# Altium footprint library CHIP-Library.PcbLib: 345 footprints (part 1 of 22)
Each footprint in its own frame and in the unit in brackets; x right, y up, seen from the top. Pads: shape width x height; smd on the part's side, far side on the other; paste and mask are expansions set on the pad; w line width, h text height; cw(c..) or ccw(c..) is an arc to the next point about the centre after c.
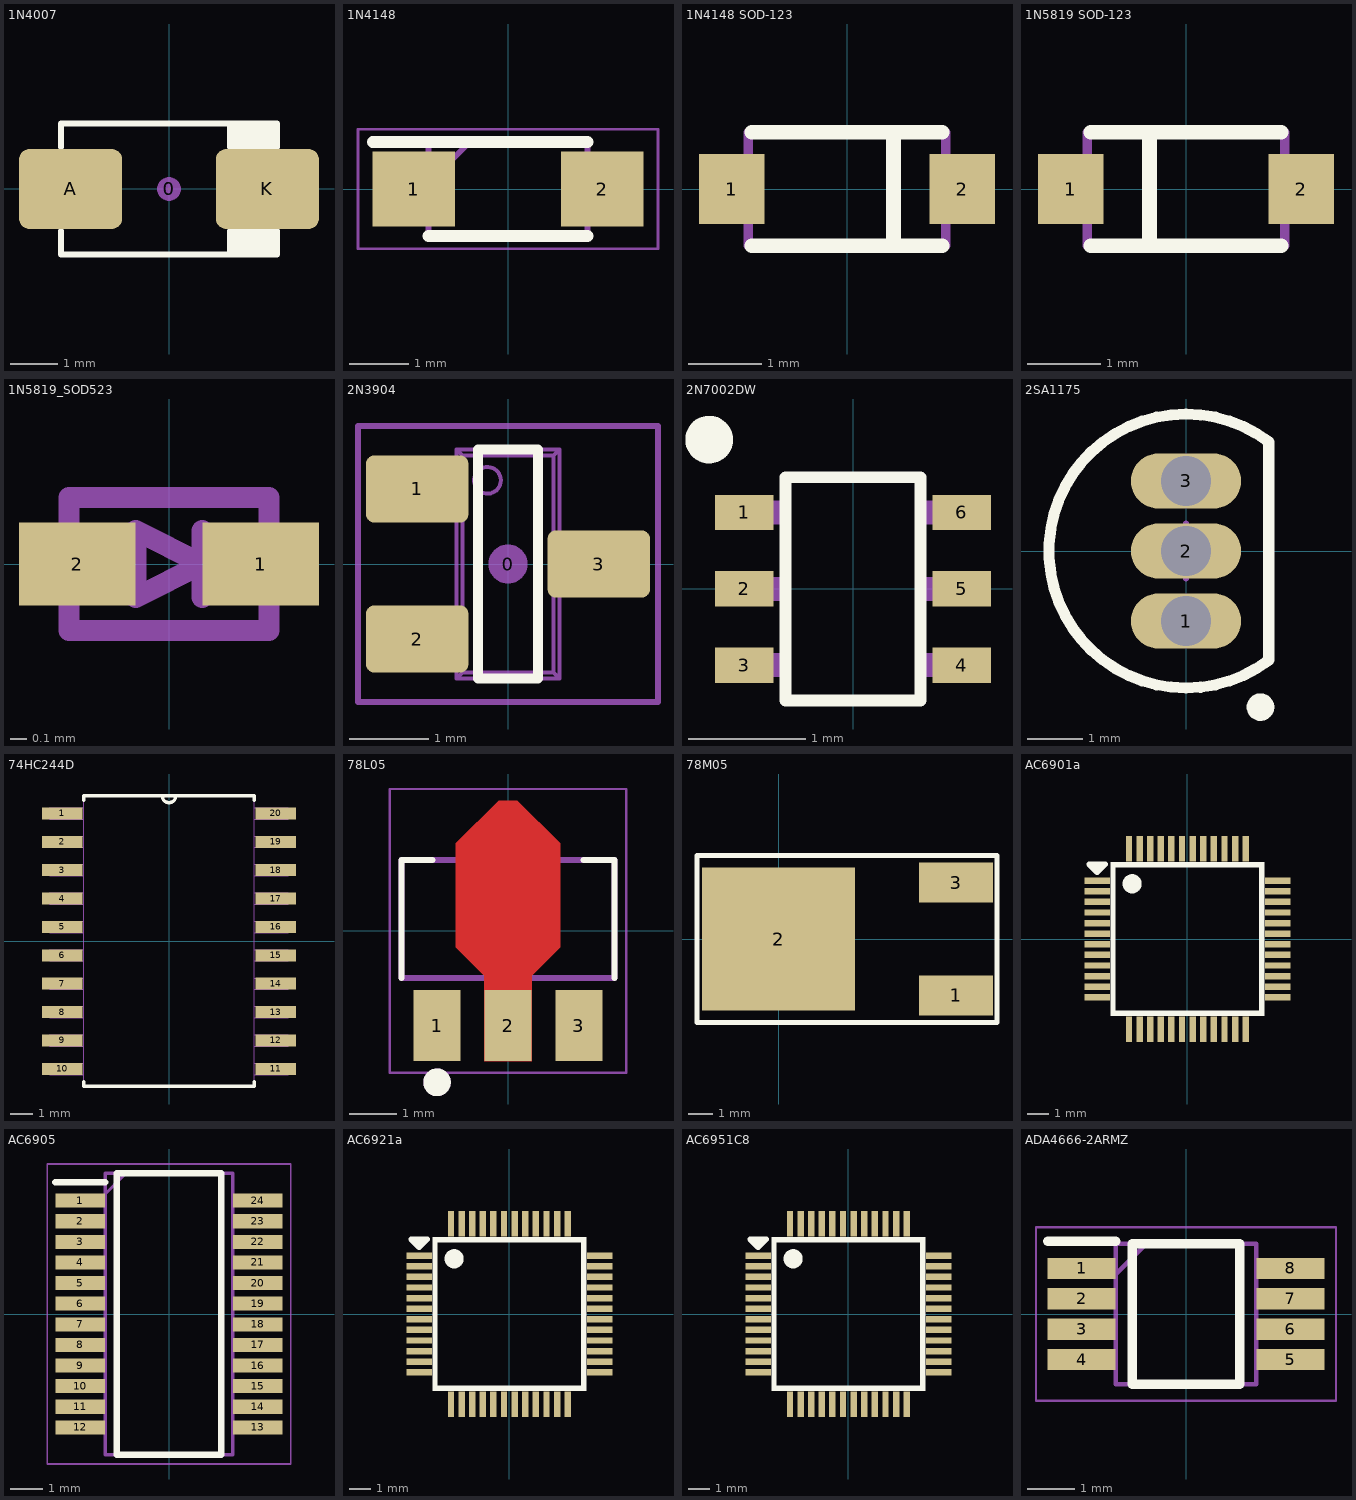
[diagram p0: the footprints below, top view; thin cyan lines are the x and y axes]

## 1N4007 [mm] "DO214 variation AC. SMA"
height 2.5
pads (3):
  round 0.508 on Mech15: 0(0,0)
  rrect25% 2.2x1.7 smd: A(-2.1,0) K(2.1,0)
Top Overlay:
  rectangle: 1.3,0.9 2.3,1.4
  rectangle: 1.3,-1.4 2.3,-0.9
  lines w0.127: -2.3,-0.9 -2.3,-1.4 2.3,-1.4 2.3,-0.9 1.3,-0.9 1.3,-1.4 ; -2.3,0.9 -2.3,1.4 2.3,1.4 2.3,0.9 1.3,0.9 ; 1.3,0.911 1.3,1.4
3D body "SW3dPS-DO-214AC SMA.STEP": height 2.42, standoff 0.02, extent -2.6,-1.3 2.6,1.3

## 1N4148 [mm]
pads (2):
  rect 1.4x1.27 smd: 1(-1.6,0) 2(1.6,0)
Top Overlay:
  lines w0.2: -2.3,0.8 1.35,0.8 ; -1.35,-0.8 1.35,-0.8
Mechanical 13:
  lines w0.1: -1.35,0.1 -0.65,0.8 ; -1.35,-0.8 -1.35,0.8 1.35,0.8 1.35,-0.8 -1.35,-0.8
Mechanical 15:
  lines w0.05: -2.55,-1.016 -2.55,1.016 2.55,1.016 2.55,-1.016 -2.55,-1.016
3D body "1n4148ws-7-f.stp": height 1.06, standoff -0.04, extent -1.25,-0.635 1.25,0.665

## 1N4148 SOD-123 [mm]
pads (2):
  rect 0.9x0.95 smd: 1(-1.575,0) 2(1.575,0)
Top Overlay:
  lines w0.203: -1.3,-0.775 0.635,-0.775 0.635,0.775 -1.3,0.775 ; -0.5,-0.775 1.3,-0.775 ; -0.5,0.775 1.3,0.775
Mechanical 13:
  lines w0.127: -1.35,-0.775 -1.35,0.775 1.35,0.775 1.35,-0.775 -1.35,-0.775
3D body "CircuitWorks-SOD123.step": height 1.28, standoff 0.01, extent -1.85,-0.8 1.85,0.8

## 1N5819 SOD-123 [mm]
pads (2):
  rect 0.9x0.95 smd: 1(-1.575,0) 2(1.575,0)
Top Overlay:
  lines w0.203: -1.3,-0.775 -0.5,-0.775 ; -1.3,0.775 -0.5,0.775 ; 1.3,-0.775 -0.5,-0.775 ; 1.3,0.775 -0.5,0.775 ; -0.5,-0.775 -0.5,0.775
Mechanical 13:
  lines w0.127: -1.35,-0.775 -1.35,0.775 1.35,0.775 1.35,-0.775 -1.35,-0.775
3D body "CircuitWorks-SOD123.step": height 1.28, standoff 0.01, extent -1.85,-0.8 1.85,0.8

## 1N5819_SOD523 [mm]
pads (2):
  rect 0.7x0.5 smd: 1(0.55,0) 2(-0.55,0)
Mechanical 13:
  region: -0.6,-0.15 -0.801,-0.15 -0.801,0.15 -0.6,0.15
  region: 0.8,-0.15 0.6,-0.15 0.6,0.15 0.8,0.15
  lines w0.127: 0.2,-0.2 0.2,0 ; 0.2,0.2 0.2,0 ; 0.2,0 -0.2,-0.2 -0.2,0.2 0.2,0 ; -0.6,-0.4 -0.6,0.4 0.6,0.4 0.6,-0.4 -0.6,-0.4
3D body "User Library-SOD-523F.step": height 0.71, standoff 0.01, extent -0.8,-0.399 0.8,0.399

## 2N3904 [mm] "BJT TRANSISTOR SOT23, 3 pin"
height 1.003
pads (4):
  round 0.5 on Mech15: 0(0,0)
  rrect25% 1.3x0.85 smd: 1(-1.15,0.95) 2(-1.15,-0.95) 3(1.15,0)
Top Overlay:
  lines w0.127: -0.381,-1.45 0.381,-1.45 0.381,1.45 -0.381,1.45 -0.381,-1.45
  text "." at -2.125,0.95 h1.4
Mechanical 13:
  circle w0.05: c-0.26,1.06 r0.169
  lines w0.05: -1.19,-1.19 -1.19,-0.71 ; -1.19,0.71 -1.19,1.19 ; -1.099,-1.19 -1.099,-0.71 ; -1.099,0.71 -1.099,1.19 ; -1.074,-1.19 -1.074,-0.71 ; -1.074,0.71 -1.074,1.19 ; -0.825,-1.19 -0.825,-0.71 ; -0.825,0.71 -0.825,1.19 ; -0.65,-1.19 -1.4,-1.19 -1.4,-0.71 -0.65,-0.71 ; -0.65,0.71 -1.4,0.71 -1.4,1.19 -0.65,1.19 ; 0.65,-0.24 1.4,-0.24 1.4,0.24 0.65,0.24 ; 0.825,-0.24 0.825,0.24 ; 1.074,-0.24 1.074,0.24 ; 1.099,-0.24 1.099,0.24 ; 1.19,-0.24 1.19,0.24 ; -0.65,-1.45 -0.576,-1.376 ; -0.65,-1.45 -0.65,1.45 ; -0.65,-1.45 0.65,-1.45 ; -0.65,1.45 0.65,1.45 ; -0.65,1.45 -0.576,1.376 ; -0.576,-1.376 -0.576,1.376 ; -0.576,-1.376 0.576,-1.376 ; -0.576,1.376 0.576,1.376 ; 0.576,-1.376 0.576,1.376 ; 0.576,-1.376 0.65,-1.45 ; 0.576,1.376 0.65,1.45 ; 0.65,-1.45 0.65,1.45
Mechanical 15:
  lines w0.076: -1.9,-1.75 1.9,-1.75 1.9,1.75 -1.9,1.75 -1.9,-1.75
3D body "SOT23-3.STEP": height 1.29, standoff -0.01, extent -1.4,-1.45 1.4,1.45

## 2N7002DW [mm] "SOT363"
pads (6):
  rect 0.5x0.3 smd paste-0.025 mask+0: 1(-0.925,0.65) 2(-0.925,0) 3(-0.925,-0.65) 4(0.925,-0.65) 5(0.925,0) 6(0.925,0.65)
Top Overlay:
  circle w0.2: c-1.225,1.27 r0.103
  lines w0.102: -0.575,-0.95 -0.575,0.95 0.575,0.95 0.575,-0.95 -0.575,-0.95
Top Solder:
  region: 1.225,0.45 0.6,0.45 0.6,0.85 1.225,0.85
  region: 1.225,-0.2 0.6,-0.2 0.6,0.2 1.225,0.2
  region: 1.225,-0.85 0.6,-0.85 0.6,-0.45 1.225,-0.45
  region: -0.6,-0.85 -1.225,-0.85 -1.225,-0.45 -0.6,-0.45
  region: -0.6,-0.2 -1.225,-0.2 -1.225,0.2 -0.6,0.2
  region: -0.6,0.45 -1.225,0.45 -1.225,0.85 -0.6,0.85
Mechanical 13:
  region: 1.05,0.55 0.575,0.55 0.575,0.75 1.05,0.75
  region: 1.05,-0.1 0.575,-0.1 0.575,0.1 1.05,0.1
  region: 1.05,-0.75 0.575,-0.75 0.575,-0.55 1.05,-0.55
  region: -0.575,-0.75 -1.05,-0.75 -1.05,-0.55 -0.575,-0.55
  region: -0.575,-0.1 -1.05,-0.1 -1.05,0.1 -0.575,0.1
  region: -0.575,0.55 -1.05,0.55 -1.05,0.75 -0.575,0.75
3D body "step_temp.STEP": height 1, standoff 0, extent -1.05,-1 1.05,1

## 2SA1175 [mm] "TO, Flat Index; 3 In-Line, Axial Leads; Body Dia. 4.5mm; Leads 0.51 x 0.48 mm (max)"
height 6.86
pads (3):
  oval 2x1 hole 0.9: 1(0,-1.27) 2(0,0) 3(0,1.27)
Top Overlay:
  circle w0.25: c1.35,-2.83 r0.125
  lines w0.2: 1.5,-1.98 cw(c0,0) 1.5,1.98 1.5,-1.98
Mechanical 13:
  lines w0.1: 1.5,-1.98 cw(c0,0) 1.5,1.98 1.5,-1.98
Mechanical 15:
  lines w0.1: -0.5,0 0.5,0 ; 0,-0.5 0,0.5
3D body: height 6.86, standoff 2.2, extent -2.485,-2.495 1.501,2.495

## 74HC244D [mil] "Octal buffer/line driver - SO20 Package"
height 35.43
pads (20):
  rect 71x21 smd: 1(-188,225) 2(-188,175) 3(-188,125) 4(-188,75) 5(-188,25) 6(-188,-25) 7(-188,-75) 8(-188,-125) 9(-188,-175) 10(-188,-225) 11(188,-225) 12(188,-175) 13(188,-125) 14(188,-75) 15(188,-25) 16(188,25) 17(188,75) 18(188,125) 19(188,175) 20(188,225)
Top Overlay:
  lines w6: -150,-248 -150,-256 150,-256 150,-248 ; -150,248 -150,256 -12,256 ; 150,248 150,256 12,256 ; -12,256 ccw(c0,256) 12,256 ; -12,256 12,256
Mechanical 13:
  lines w0: -12,256 ccw(c0,256) 12,256 ; -12,256 -150,256 -150,-256 150,-256 150,256 12,256 ; -12,256 12,256 ; -210,-235 -150,-235 -150,-215 -210,-215 -210,-235 ; -210,-185 -150,-185 -150,-165 -210,-165 -210,-185 ; -210,-135 -150,-135 -150,-115 -210,-115 -210,-135 ; -210,-85 -150,-85 -150,-65 -210,-65 -210,-85 ; -210,-35 -150,-35 -150,-15 -210,-15 -210,-35 ; -210,15 -150,15 -150,35 -210,35 -210,15 ; -210,65 -150,65 -150,85 -210,85 -210,65 ; -210,115 -150,115 -150,135 -210,135 -210,115 ; -210,165 -150,165 -150,185 -210,185 -210,165 ; -210,215 -150,215 -150,235 -210,235 -210,215 ; 150,-235 210,-235 210,-215 150,-215 150,-235 ; 150,-185 210,-185 210,-165 150,-165 150,-185 ; 150,-135 210,-135 210,-115 150,-115 150,-135 ; 150,-85 210,-85 210,-65 150,-65 150,-85 ; 150,-35 210,-35 210,-15 150,-15 150,-35 ; 150,15 210,15 210,35 150,35 150,15 ; 150,65 210,65 210,85 150,85 150,65 ; 150,115 210,115 210,135 150,135 150,115 ; 150,165 210,165 210,185 150,185 150,165 ; 150,215 210,215 210,235 150,235 150,215
3D body "User Library-SOIC20.step": height 86.61, standoff -1.47, extent -199.48,-248.04 199.49,248.03

## 78L05 [mm] "SOT-89"
pads (3):
  rect 1x1.5 smd: 1(-1.5,-2) 3(1.5,-2)
  rect 1x1.5 smd paste-2 mask+0: 2(0,-2)
Top Layer:
  region: 1.1,1.85 1.1,-0.35 0.5,-0.95 0.5,-2.75 -0.5,-2.75 -0.5,-0.95 -1.1,-0.35 -1.1,1.85 -0.2,2.75 0.2,2.75
Top Overlay:
  circle w0.3: c-1.5,-3.2 r0.141
  lines w0.127: -2.25,-1 -2.25,1.5 -1.6,1.5 ; 1.6,1.5 2.25,1.5 2.25,-1
Top Paste:
  region: 1.1,1.85 1.1,-0.35 0.5,-0.95 0.5,-2.75 -0.5,-2.75 -0.5,-0.95 -1.1,-0.35 -1.1,1.85 -0.2,2.75 0.2,2.75
Top Solder:
  region: 1.2,1.85 1.2,-0.35 0.6,-0.95 0.6,-2.85 -0.6,-2.85 -0.6,-0.95 -1.2,-0.35 -1.2,1.85 -0.2,2.85 0.2,2.85
Mechanical 13:
  circle w0.3: c-1.5,-3.2 r0.141
  lines w0.127: -2.25,-1 -2.25,1.5 2.25,1.5 2.25,-1 -2.25,-1
Mechanical 15:
  lines w0.05: -2.5,-3 -2.5,3 2.5,3 2.5,-3 -2.5,-3
3D body "User Library-SOT89-3-1.step": height 1.7, standoff 0, extent -2.286,-2.352 2.413,2.098

## 78M05 [mm] "D-PAK"
height 2.38
pads (3):
  rect 3x1.6 smd: 1(7.18,-2.286) 3(7.18,2.286)
  rect 6.2x5.8 smd paste-3: 2(0,0)
Top Overlay:
  lines w0.2: 7.137,3.378 8.839,3.378 8.839,-3.378 -3.302,-3.378 -3.302,3.378 7.163,3.378
Top Paste:
  rectangle: -2.667,1.397 -1.397,2.413
  rectangle: -2.667,-0.508 -1.397,0.508
  rectangle: -2.667,-2.286 -1.397,-1.27
  rectangle: -0.635,-0.508 0.635,0.508
  rectangle: -0.635,1.397 0.635,2.413
  rectangle: -0.635,-2.286 0.635,-1.27
  rectangle: 1.515,-0.508 2.785,0.508
  rectangle: 1.515,1.397 2.785,2.413
  rectangle: 1.515,-2.286 2.785,-1.27
3D body "User Library-TO252AA.STEP": height 2.3, standoff -0.01, extent -2.7,-3.29 7,3.29

## AC6901a [mm]
height 5.33
pads (48):
  rect 1.2x0.3 smd mask+0.051: 1(-4.25,2.75) 2(-4.25,2.25) 3(-4.25,1.75) 4(-4.25,1.25) 5(-4.25,0.75) 6(-4.25,0.25) 7(-4.25,-0.25) 8(-4.25,-0.75) 9(-4.25,-1.25) 10(-4.25,-1.75) 11(-4.25,-2.25) 12(-4.25,-2.75) 25(4.25,-2.75) 26(4.25,-2.25) 27(4.25,-1.75) 28(4.25,-1.25) 29(4.25,-0.75) 30(4.25,-0.25) 31(4.25,0.25) 32(4.25,0.75) 33(4.25,1.25) 34(4.25,1.75) 35(4.25,2.25) 36(4.25,2.75)
  rect 0.3x1.2 smd mask+0.051: 13(-2.75,-4.25) 14(-2.25,-4.25) 15(-1.75,-4.25) 16(-1.25,-4.25) 17(-0.75,-4.25) 18(-0.25,-4.25) 19(0.25,-4.25) 20(0.75,-4.25) 21(1.25,-4.25) 22(1.75,-4.25) 23(2.25,-4.25) 24(2.75,-4.25) 37(2.75,4.25) 38(2.25,4.25) 39(1.75,4.25) 40(1.25,4.25) 41(0.75,4.25) 42(0.25,4.25) 43(-0.25,4.25) 44(-0.75,4.25) 45(-1.25,4.25) 46(-1.75,4.25) 47(-2.25,4.25) 48(-2.75,4.25)
Top Overlay:
  circle w0.6: c-2.6,2.6 r0.15
  rectangle: -3.373,-3.627 3.627,-3.373
  region: 3.373,3.373 3.373,-3.627 3.627,-3.627 3.627,3.373
  region: -2.992,-3.373 -3.627,-3.373 -3.627,-3.627 -2.992,-3.627
  region: -3.627,-2.992 -3.627,-3.627 -3.373,-3.627 -3.373,-2.992
  region: -2.992,3.627 -3.627,3.627 -3.627,3.373 -2.992,3.373
  region: -3.373,-3.627 -3.373,3.627 -3.627,3.627 -3.627,-3.627
  region: 3.627,2.992 3.627,3.627 3.373,3.627 3.373,2.992
  rectangle: -3.175,3.373 3.627,3.627
  region: -4.25,3.131 -3.869,3.512 -4.631,3.512
  lines w0.254: -3.5,-3.119 -3.5,-3.5 -3.119,-3.5 ; -3.5,3.119 -3.5,3.5 -3.119,3.5 ; 3.119,-3.5 3.5,-3.5 3.5,-3.119 ; 3.119,3.5 3.5,3.5 3.5,3.119 ; -4.631,3.512 -4.25,3.131 -3.869,3.512 -4.25,3.512 -4.631,3.512
3D body "LQFP48.STEP": height 1.5, standoff 0, extent -4.5,-4.5 4.5,4.5

## AC6905 [mm]
pads (24):
  rect 1.535x0.435 smd: 1(-2.732,3.492) 2(-2.732,2.858) 3(-2.732,2.222) 4(-2.732,1.588) 5(-2.732,0.952) 6(-2.732,0.318) 7(-2.732,-0.318) 8(-2.732,-0.952) 9(-2.732,-1.588) 10(-2.732,-2.222) 11(-2.732,-2.858) 12(-2.732,-3.492) 13(2.732,-3.492) 14(2.732,-2.858) 15(2.732,-2.222) 16(2.732,-1.588) 17(2.732,-0.952) 18(2.732,-0.318) 19(2.732,0.318) 20(2.732,0.952) 21(2.732,1.588) 22(2.732,2.222) 23(2.732,2.858) 24(2.732,3.492)
Top Overlay:
  lines w0.2: -3.5,4.06 -1.965,4.06 ; -1.615,-4.331 -1.615,4.331 1.615,4.331 1.615,-4.331 -1.615,-4.331
Mechanical 13:
  lines w0.1: -1.965,3.696 -1.33,4.331 ; -1.965,-4.331 -1.965,4.331 1.965,4.331 1.965,-4.331 -1.965,-4.331
Mechanical 15:
  lines w0.05: -3.75,-4.619 -3.75,4.619 3.75,4.619 3.75,-4.619 -3.75,-4.619
3D body "AC6905A.stp": height 1.8, standoff 0, extent -3.01,-4.331 3.01,4.331

## AC6921a [mm]
height 5.33
pads (48):
  rect 1.2x0.3 smd mask+0.051: 1(-4.25,2.75) 2(-4.25,2.25) 3(-4.25,1.75) 4(-4.25,1.25) 5(-4.25,0.75) 6(-4.25,0.25) 7(-4.25,-0.25) 8(-4.25,-0.75) 9(-4.25,-1.25) 10(-4.25,-1.75) 11(-4.25,-2.25) 12(-4.25,-2.75) 25(4.25,-2.75) 26(4.25,-2.25) 27(4.25,-1.75) 28(4.25,-1.25) 29(4.25,-0.75) 30(4.25,-0.25) 31(4.25,0.25) 32(4.25,0.75) 33(4.25,1.25) 34(4.25,1.75) 35(4.25,2.25) 36(4.25,2.75)
  rect 0.3x1.2 smd mask+0.051: 13(-2.75,-4.25) 14(-2.25,-4.25) 15(-1.75,-4.25) 16(-1.25,-4.25) 17(-0.75,-4.25) 18(-0.25,-4.25) 19(0.25,-4.25) 20(0.75,-4.25) 21(1.25,-4.25) 22(1.75,-4.25) 23(2.25,-4.25) 24(2.75,-4.25) 37(2.75,4.25) 38(2.25,4.25) 39(1.75,4.25) 40(1.25,4.25) 41(0.75,4.25) 42(0.25,4.25) 43(-0.25,4.25) 44(-0.75,4.25) 45(-1.25,4.25) 46(-1.75,4.25) 47(-2.25,4.25) 48(-2.75,4.25)
Top Overlay:
  circle w0.6: c-2.6,2.6 r0.15
  rectangle: -3.175,3.373 3.627,3.627
  region: 3.627,2.992 3.627,3.627 3.373,3.627 3.373,2.992
  region: -3.373,-3.627 -3.373,3.627 -3.627,3.627 -3.627,-3.627
  region: -2.992,3.627 -3.627,3.627 -3.627,3.373 -2.992,3.373
  region: -3.627,-2.992 -3.627,-3.627 -3.373,-3.627 -3.373,-2.992
  region: -2.992,-3.373 -3.627,-3.373 -3.627,-3.627 -2.992,-3.627
  region: 3.373,3.373 3.373,-3.627 3.627,-3.627 3.627,3.373
  rectangle: -3.373,-3.627 3.627,-3.373
  region: -4.25,3.131 -3.869,3.512 -4.631,3.512
  lines w0.254: -3.5,-3.119 -3.5,-3.5 -3.119,-3.5 ; -3.5,3.119 -3.5,3.5 -3.119,3.5 ; 3.119,-3.5 3.5,-3.5 3.5,-3.119 ; 3.119,3.5 3.5,3.5 3.5,3.119 ; -4.631,3.512 -4.25,3.512 -3.869,3.512 -4.25,3.131 -4.631,3.512
3D body "LQFP48.STEP": height 1.5, standoff 0, extent -4.5,-4.5 4.5,4.5

## AC6951C8 [mm] "LQFP48"
height 5.33
pads (48):
  rect 1.2x0.3 smd mask+0.051: 1(-4.25,2.75) 2(-4.25,2.25) 3(-4.25,1.75) 4(-4.25,1.25) 5(-4.25,0.75) 6(-4.25,0.25) 7(-4.25,-0.25) 8(-4.25,-0.75) 9(-4.25,-1.25) 10(-4.25,-1.75) 11(-4.25,-2.25) 12(-4.25,-2.75) 25(4.25,-2.75) 26(4.25,-2.25) 27(4.25,-1.75) 28(4.25,-1.25) 29(4.25,-0.75) 30(4.25,-0.25) 31(4.25,0.25) 32(4.25,0.75) 33(4.25,1.25) 34(4.25,1.75) 35(4.25,2.25) 36(4.25,2.75)
  rect 0.3x1.2 smd mask+0.051: 13(-2.75,-4.25) 14(-2.25,-4.25) 15(-1.75,-4.25) 16(-1.25,-4.25) 17(-0.75,-4.25) 18(-0.25,-4.25) 19(0.25,-4.25) 20(0.75,-4.25) 21(1.25,-4.25) 22(1.75,-4.25) 23(2.25,-4.25) 24(2.75,-4.25) 37(2.75,4.25) 38(2.25,4.25) 39(1.75,4.25) 40(1.25,4.25) 41(0.75,4.25) 42(0.25,4.25) 43(-0.25,4.25) 44(-0.75,4.25) 45(-1.25,4.25) 46(-1.75,4.25) 47(-2.25,4.25) 48(-2.75,4.25)
Top Overlay:
  circle w0.6: c-2.6,2.6 r0.15
  rectangle: -3.373,-3.627 3.627,-3.373
  region: 3.373,3.373 3.373,-3.627 3.627,-3.627 3.627,3.373
  region: -2.992,-3.373 -3.627,-3.373 -3.627,-3.627 -2.992,-3.627
  region: -3.627,-2.992 -3.627,-3.627 -3.373,-3.627 -3.373,-2.992
  region: -2.992,3.627 -3.627,3.627 -3.627,3.373 -2.992,3.373
  region: -3.373,-3.627 -3.373,3.627 -3.627,3.627 -3.627,-3.627
  region: 3.627,2.992 3.627,3.627 3.373,3.627 3.373,2.992
  rectangle: -3.175,3.373 3.627,3.627
  region: -4.25,3.131 -3.869,3.512 -4.631,3.512
  lines w0.254: -3.5,-3.119 -3.5,-3.5 -3.119,-3.5 ; -3.5,3.119 -3.5,3.5 -3.119,3.5 ; 3.119,-3.5 3.5,-3.5 3.5,-3.119 ; 3.119,3.5 3.5,3.5 3.5,3.119 ; -4.631,3.512 -4.25,3.131 -3.869,3.512 -4.25,3.512 -4.631,3.512
3D body "LQFP48.STEP": height 1.5, standoff 0, extent -4.5,-4.5 4.5,4.5

## ADA4666-2ARMZ [mm]
pads (8):
  rect 1.45x0.45 smd: 1(-2.225,0.975) 2(-2.225,0.325) 3(-2.225,-0.325) 4(-2.225,-0.975) 5(2.225,-0.975) 6(2.225,-0.325) 7(2.225,0.325) 8(2.225,0.975)
Top Overlay:
  lines w0.2: -2.95,1.55 -1.5,1.55 ; -1.15,-1.5 1.15,-1.5 1.15,1.5 -1.15,1.5 -1.15,-1.5
Mechanical 13:
  lines w0.1: -1.5,0.85 -0.85,1.5 ; -1.5,-1.5 1.5,-1.5 1.5,1.5 -1.5,1.5 -1.5,-1.5
Mechanical 15:
  lines w0.05: -3.2,-1.85 3.2,-1.85 3.2,1.85 -3.2,1.85 -3.2,-1.85
3D body "ADA4666-2ARMZ.stp": height 1.1, standoff 0, extent -2.45,-1.5 2.45,1.5